# Altium footprint library WR-MPC3.PcbLib: 235 footprints (part 2 of 15)
Each footprint in its own frame and in the unit in brackets; x right, y up, seen from the top. Pads: shape width x height; smd on the part's side, far side on the other; paste and mask are expansions set on the pad; w line width, h text height; cw(c..) or ccw(c..) is an arc to the next point about the centre after c.
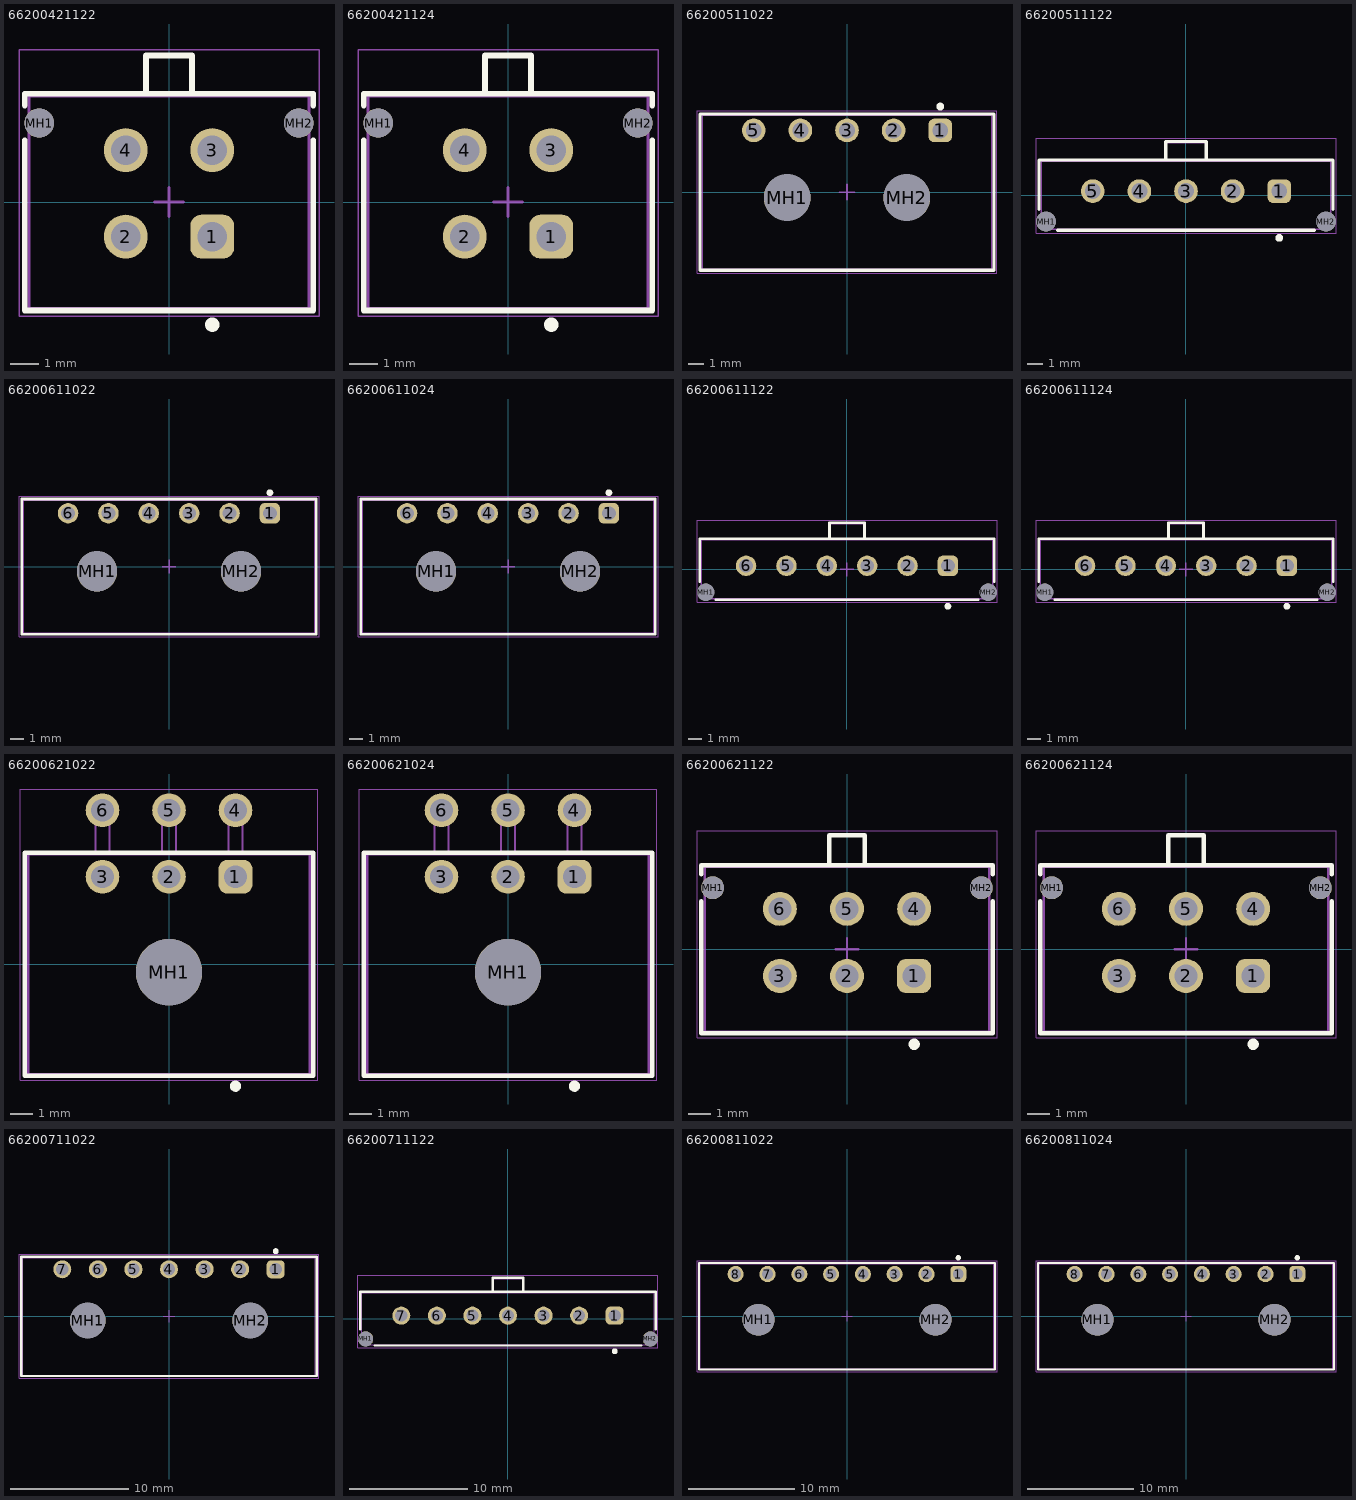
[diagram p1: the footprints below, top view; thin cyan lines are the x and y axes]

## 66200421122 [mm] "Dual row Vertical header 04p"
height 9.9
pads (6):
  rrect50% 1.52x1.52 hole 1.02: 1(1.5,-1.2)
  round 1.52 hole 1.02: 2(-1.5,-1.2) 3(1.5,1.8) 4(-1.5,1.8)
  round 1.02 hole 1.02 unplated: MH1(-4.5,2.74) MH2(4.5,2.74)
Top Overlay:
  circle w0.25: c1.5,-4.25 r0.125
  lines w0.2: -5,2.145 -5,-3.755 5,-3.755 5,2.145 ; -5,3.345 -5,3.755 5,3.755 5,3.345 ; -0.8,3.755 -0.8,5.08 0.8,5.08 0.8,3.755
Top Assembly:
  lines w0.1: -0.8,3.68 -0.8,5.08 0.8,5.08 0.8,3.68 ; -4.85,-3.68 4.85,-3.68 4.85,3.68 -4.85,3.68 -4.85,-3.68
Top Designator:
  text ".Designator" at -3.647,-0.357 h1
Top 3D Body:
  lines w0.1: -0.8,3.68 -0.8,5.08 0.8,5.08 0.8,3.68 ; -4.85,-3.68 4.85,-3.68 4.85,3.68 -4.85,3.68 -4.85,-3.68
Top Courtyard:
  lines w0.05: -5.2,-3.955 5.2,-3.955 5.2,5.28 -5.2,5.28 -5.2,-3.955
Top Component Center:
  lines w0.1: -0.5,0 0.5,0 ; 0,-0.5 0,0.5
3D body "66200421122.stp": height 9.93, standoff -3.17, extent -4.85,-3.68 4.85,5.08

## 66200421124 [mm] "Dual row Vertical header 04p"
height 9.9
pads (6):
  rrect50% 1.52x1.52 hole 1.02: 1(1.5,-1.2)
  round 1.52 hole 1.02: 2(-1.5,-1.2) 3(1.5,1.8) 4(-1.5,1.8)
  round 1.02 hole 1.02 unplated: MH1(-4.5,2.74) MH2(4.5,2.74)
Top Overlay:
  circle w0.25: c1.5,-4.25 r0.125
  lines w0.2: -5,2.145 -5,-3.755 5,-3.755 5,2.145 ; -5,3.345 -5,3.755 5,3.755 5,3.345 ; -0.8,3.755 -0.8,5.08 0.8,5.08 0.8,3.755
Top Assembly:
  lines w0.1: -0.8,3.68 -0.8,5.08 0.8,5.08 0.8,3.68 ; -4.85,-3.68 4.85,-3.68 4.85,3.68 -4.85,3.68 -4.85,-3.68
Top Designator:
  text ".Designator" at -3.647,-0.357 h1
Top 3D Body:
  lines w0.1: -0.8,3.68 -0.8,5.08 0.8,5.08 0.8,3.68 ; -4.85,-3.68 4.85,-3.68 4.85,3.68 -4.85,3.68 -4.85,-3.68
Top Courtyard:
  lines w0.05: -5.2,-3.955 5.2,-3.955 5.2,5.28 -5.2,5.28 -5.2,-3.955
Top Component Center:
  lines w0.1: -0.5,0 0.5,0 ; 0,-0.5 0,0.5
3D body "66200421124.stp": height 9.93, standoff -3.17, extent -4.85,-3.68 4.85,5.08

## 66200511022 [mm] "3.00mm Male Single Row Angled Header with Plastic Pegs, 5p"
height 5.07
pads (7):
  rrect50% 1.52x1.52 hole 1.02: 1(6,3.97)
  round 1.52 hole 1.02: 2(3,3.97) 3(0,3.97) 4(-3,3.97) 5(-6,3.97)
  round 3 hole 3 unplated: MH1(-3.85,-0.35) MH2(3.85,-0.35)
Top Overlay:
  circle w0.25: c6,5.5 r0.125
  lines w0.2: -9.45,-5.025 -9.45,5.025 9.45,5.025 9.45,-5.025 -9.45,-5.025
Top Assembly:
  lines w0.1: -9.325,-4.95 9.325,-4.95 9.325,4.95 -9.325,4.95 -9.325,-4.95
Top Designator:
  text ".Designator" at -3.647,-0.357 h1
Top 3D Body:
  lines w0.1: -9.325,-4.95 9.325,-4.95 9.325,4.95 -9.325,4.95 -9.325,-4.95
Top Courtyard:
  lines w0.05: -9.65,-5.225 -9.65,5.225 9.65,5.225 9.65,-5.225 -9.65,-5.225
Top Component Center:
  lines w0.1: -0.5,0 0.5,0 ; 0,-0.5 0,0.5
3D body "66200511022.stp": height 5.6, standoff -3.16, extent -9.325,-4.95 9.325,4.95

## 66200511122 [mm] "3.00mm Male Single Row Vertical Header, 5p"
height 11
pads (7):
  rrect50% 1.52x1.52 hole 1.02: 1(6,0.255)
  round 1.52 hole 1.02: 2(3,0.255) 3(0,0.255) 4(-3,0.255) 5(-6,0.255)
  round 1.27 hole 1.27 unplated: MH1(-9,-1.705) MH2(9,-1.705)
Top Overlay:
  circle w0.25: c6,-2.75 r0.125
  lines w0.2: -9.45,-0.91 -9.45,2.26 9.45,2.26 9.45,-0.91 ; -8.255,-2.26 8.255,-2.26 ; -1.3,2.26 -1.3,3.46 1.3,3.46 1.3,2.26
Top Assembly:
  lines w0.1: -1.3,2.185 -1.3,3.385 1.3,3.385 1.3,2.185 ; 9.325,-2.185 9.325,2.185 -9.325,2.185 -9.325,-2.185 9.33,-2.185
Top Designator:
  text ".Designator" at -3.647,-0.357 h1
Top 3D Body:
  lines w0.1: -1.3,2.185 -1.3,3.385 1.3,3.385 1.3,2.185 ; 9.325,-2.185 9.325,2.185 -9.325,2.185 -9.325,-2.185 9.33,-2.185
Top Courtyard:
  lines w0.05: -9.65,-2.46 9.65,-2.46 9.65,3.66 -9.65,3.66 -9.65,-2.46
Top Component Center:
  lines w0.1: -0.5,0 0.5,0 ; 0,-0.5 0,0.5
3D body "66200511122.stp": height 9.93, standoff -3.15, extent -9.322,-2.185 9.328,3.385

## 66200611022 [mm] "3.00mm Male Single Row Angled Header with Plastic Pegs, 6p"
height 5.07
pads (8):
  rrect50% 1.52x1.52 hole 1.02: 1(7.5,3.97)
  round 1.52 hole 1.02: 2(4.5,3.97) 3(1.5,3.97) 4(-1.5,3.97) 5(-4.5,3.97) 6(-7.5,3.97)
  round 3 hole 3 unplated: MH1(-5.35,-0.35) MH2(5.35,-0.35)
Top Overlay:
  circle w0.25: c7.5,5.5 r0.125
  lines w0.2: -10.95,-5.025 10.95,-5.025 10.95,5.025 -10.95,5.025 -10.95,-5.025
Top Assembly:
  lines w0.1: -10.825,-4.95 -10.825,4.95 10.825,4.95 10.825,-4.95 -10.825,-4.95
Top Designator:
  text ".Designator" at -3.647,-0.357 h1
Top 3D Body:
  lines w0.1: -10.825,-4.95 -10.825,4.95 10.825,4.95 10.825,-4.95 -10.825,-4.95
Top Courtyard:
  lines w0.05: -11.15,-5.225 11.15,-5.225 11.15,5.225 -11.15,5.225 -11.15,-5.225
Top Component Center:
  lines w0.1: -0.5,0 0.5,0 ; 0,-0.5 0,0.5
3D body "66200611022.stp": height 5.6, standoff -3.16, extent -10.825,-4.95 10.825,4.95

## 66200611024 [mm] "3.00mm Male Single Row Angled Header with Plastic Pegs, 6p"
height 5.07
pads (8):
  rrect50% 1.52x1.52 hole 1.02: 1(7.5,3.97)
  round 1.52 hole 1.02: 2(4.5,3.97) 3(1.5,3.97) 4(-1.5,3.97) 5(-4.5,3.97) 6(-7.5,3.97)
  round 3 hole 3 unplated: MH1(-5.35,-0.35) MH2(5.35,-0.35)
Top Overlay:
  circle w0.25: c7.5,5.5 r0.125
  lines w0.2: -10.95,-5.025 -10.95,5.025 10.95,5.025 10.95,-5.025 -10.95,-5.025
Top Assembly:
  lines w0.1: -10.825,-4.95 10.825,-4.95 10.825,4.95 -10.825,4.95 -10.825,-4.95
Top Designator:
  text ".Designator" at -3.647,-0.357 h1
Top 3D Body:
  lines w0.1: -10.825,-4.95 10.825,-4.95 10.825,4.95 -10.825,4.95 -10.825,-4.95
Top Courtyard:
  lines w0.05: -11.15,-5.225 -11.15,5.225 11.15,5.225 11.15,-5.225 -11.15,-5.225
Top Component Center:
  lines w0.1: -0.5,0 0.5,0 ; 0,-0.5 0,0.5
3D body "66200611024.stp": height 5.6, standoff -3.16, extent -10.825,-4.95 10.825,4.95

## 66200611122 [mm] "3.00mm Male Single Row Vertical Header, 6p"
height 11
pads (8):
  rrect50% 1.52x1.52 hole 1.02: 1(7.5,0.255)
  round 1.52 hole 1.02: 2(4.5,0.255) 3(1.5,0.255) 4(-1.5,0.255) 5(-4.5,0.255) 6(-7.5,0.255)
  round 1.27 hole 1.27 unplated: MH1(-10.5,-1.705) MH2(10.5,-1.705)
Top Overlay:
  circle w0.25: c7.5,-2.75 r0.125
  lines w0.2: -10.95,-0.91 -10.95,2.26 10.95,2.26 10.95,-0.91 ; -9.755,-2.26 9.755,-2.26 ; -1.3,2.26 -1.3,3.46 1.3,3.46 1.3,2.26
Top Assembly:
  lines w0.1: -1.3,2.185 -1.3,3.385 1.3,3.385 1.3,2.185 ; 10.825,-2.185 10.825,2.185 -10.825,2.185 -10.825,-2.185 10.83,-2.185
Top Designator:
  text ".Designator" at -3.647,-0.357 h1
Top 3D Body:
  lines w0.1: -1.3,2.185 -1.3,3.385 1.3,3.385 1.3,2.185 ; 10.825,-2.185 10.825,2.185 -10.825,2.185 -10.825,-2.185 10.83,-2.185
Top Courtyard:
  lines w0.05: -11.15,-2.46 11.15,-2.46 11.15,3.66 -11.15,3.66 -11.15,-2.46
Top Component Center:
  lines w0.1: -0.5,0 0.5,0 ; 0,-0.5 0,0.5
3D body "66200611122.stp": height 9.93, standoff -3.82, extent -10.823,-2.185 10.828,3.385

## 66200611124 [mm] "3.00mm Male Single Row Vertical Header, 6p"
height 11
pads (8):
  rrect50% 1.52x1.52 hole 1.02: 1(7.5,0.255)
  round 1.52 hole 1.02: 2(4.5,0.255) 3(1.5,0.255) 4(-1.5,0.255) 5(-4.5,0.255) 6(-7.5,0.255)
  round 1.27 hole 1.27 unplated: MH1(-10.5,-1.705) MH2(10.5,-1.705)
Top Overlay:
  circle w0.25: c7.5,-2.75 r0.125
  lines w0.2: -10.95,-0.91 -10.95,2.26 10.95,2.26 10.95,-0.91 ; -9.755,-2.26 9.755,-2.26 ; -1.3,2.26 -1.3,3.46 1.3,3.46 1.3,2.26
Top Assembly:
  lines w0.1: -1.3,2.185 -1.3,3.385 1.3,3.385 1.3,2.185 ; 10.825,-2.185 10.825,2.185 -10.825,2.185 -10.825,-2.185 10.83,-2.185
Top Designator:
  text ".Designator" at -3.647,-0.357 h1
Top 3D Body:
  lines w0.1: -1.3,2.185 -1.3,3.385 1.3,3.385 1.3,2.185 ; 10.825,-2.185 10.825,2.185 -10.825,2.185 -10.825,-2.185 10.83,-2.185
Top Courtyard:
  lines w0.05: -11.15,-2.46 -11.15,3.66 11.15,3.66 11.15,-2.46 -11.15,-2.46
Top Component Center:
  lines w0.1: -0.5,0 0.5,0 ; 0,-0.5 0,0.5
3D body "66200611124.stp": height 9.93, standoff -3.82, extent -10.823,-2.185 10.827,3.385

## 66200621022 [mm] "Dual row Right angle header With plastic peg 06p"
height 8.76
pads (7):
  rrect50% 1.52x1.52 hole 1.02: 1(3,3.95)
  round 1.52 hole 1.02: 2(0,3.95) 3(-3,3.95) 4(3,6.95) 5(0,6.95) 6(-3,6.95)
  round 3 hole 3 unplated: MH1(0,-0.35)
Top Overlay:
  circle w0.25: c3,-5.5 r0.125
  lines w0.2: -6.5,-5.025 6.5,-5.025 6.5,5.025 -6.5,5.025 -6.5,-5.025
Top Assembly:
  lines w0.1: -3.32,4.95 -3.32,7.27 -2.68,7.27 -2.68,4.95 ; -0.32,4.95 -0.32,7.27 0.32,7.27 0.32,4.95 ; 2.68,4.95 2.68,7.27 3.32,7.27 3.32,4.95 ; -6.35,-4.95 -6.35,4.95 6.35,4.95 6.35,-4.95 -6.35,-4.95
Top Designator:
  text ".Designator" at -3.647,-0.357 h1
Top 3D Body:
  lines w0.1: -3.32,4.95 -3.32,7.27 -2.68,7.27 -2.68,4.95 ; -0.32,4.95 -0.32,7.27 0.32,7.27 0.32,4.95 ; 2.68,4.95 2.68,7.27 3.32,7.27 3.32,4.95 ; -6.35,-4.95 -6.35,4.95 6.35,4.95 6.35,-4.95 -6.35,-4.95
Top Courtyard:
  lines w0.05: -6.7,-5.225 6.7,-5.225 6.7,7.91 -6.7,7.91 -6.7,-5.225
Top Component Center:
  lines w0.1: -0.5,0 0.5,0 ; 0,-0.5 0,0.5
3D body "62000621022.stp": height 8.79, standoff -3.17, extent -6.35,-4.95 6.35,7.27

## 66200621024 [mm] "Dual row Right angle header With plastic peg 06p"
height 8.76
pads (7):
  rrect50% 1.52x1.52 hole 1.02: 1(3,3.95)
  round 1.52 hole 1.02: 2(0,3.95) 3(-3,3.95) 4(3,6.95) 5(0,6.95) 6(-3,6.95)
  round 3 hole 3 unplated: MH1(0,-0.35)
Top Overlay:
  circle w0.25: c3,-5.5 r0.125
  lines w0.2: -6.5,-5.025 -6.5,5.025 6.5,5.025 6.5,-5.025 -6.5,-5.025
Top Assembly:
  lines w0.1: -3.32,4.95 -3.32,7.27 -2.68,7.27 -2.68,4.95 ; -0.32,4.95 -0.32,7.27 0.32,7.27 0.32,4.95 ; 2.68,4.95 2.68,7.27 3.32,7.27 3.32,4.95 ; -6.35,-4.95 6.35,-4.95 6.35,4.95 -6.35,4.95 -6.35,-4.95
Top Designator:
  text ".Designator" at -3.647,-0.357 h1
Top 3D Body:
  lines w0.1: -3.32,4.95 -3.32,7.27 -2.68,7.27 -2.68,4.95 ; -0.32,4.95 -0.32,7.27 0.32,7.27 0.32,4.95 ; 2.68,4.95 2.68,7.27 3.32,7.27 3.32,4.95 ; -6.35,-4.95 6.35,-4.95 6.35,4.95 -6.35,4.95 -6.35,-4.95
Top Courtyard:
  lines w0.05: -6.7,-5.225 -6.7,7.91 6.7,7.91 6.7,-5.225 -6.7,-5.225
Top Component Center:
  lines w0.1: -0.5,0 0.5,0 ; 0,-0.5 0,0.5
3D body "66200621024.stp": height 8.78, standoff -3.19, extent -6.362,-4.955 6.365,7.274

## 66200621122 [mm] "Dual row Vertical header 06p"
height 9.9
pads (8):
  rrect50% 1.52x1.52 hole 1.02: 1(3,-1.2)
  round 1.52 hole 1.02: 2(0,-1.2) 3(-3,-1.2) 4(3,1.8) 5(0,1.8) 6(-3,1.8)
  round 1.02 hole 1.02 unplated: MH1(-6,2.74) MH2(6,2.74)
Top Overlay:
  circle w0.25: c3,-4.25 r0.125
  lines w0.2: -6.5,2.145 -6.5,-3.755 6.5,-3.755 6.5,2.145 ; -6.5,3.345 -6.5,3.755 6.5,3.755 6.5,3.345 ; -0.8,3.755 -0.8,5.08 0.8,5.08 0.8,3.755
Top Assembly:
  lines w0.1: -0.8,3.68 -0.8,5.08 0.8,5.08 0.8,3.68 ; -6.35,-3.68 -6.35,3.68 6.35,3.68 6.35,-3.68 -6.35,-3.68
Top Designator:
  text ".Designator" at -3.647,-0.357 h1
Top 3D Body:
  lines w0.1: -0.8,3.68 -0.8,5.08 0.8,5.08 0.8,3.68 ; -6.35,-3.68 -6.35,3.68 6.35,3.68 6.35,-3.68 -6.35,-3.68
Top Courtyard:
  lines w0.05: -6.7,-3.955 -6.7,5.28 6.7,5.28 6.7,-3.955 -6.7,-3.955
Top Component Center:
  lines w0.1: -0.5,0 0.5,0 ; 0,-0.5 0,0.5
3D body "66200621122.stp": height 9.93, standoff -3.17, extent -6.35,-3.68 6.35,5.08

## 66200621124 [mm] "Dual row Vertical header 06p"
height 9.9
pads (8):
  rrect50% 1.52x1.52 hole 1.02: 1(3,-1.2)
  round 1.52 hole 1.02: 2(0,-1.2) 3(-3,-1.2) 4(3,1.8) 5(0,1.8) 6(-3,1.8)
  round 1.02 hole 1.02 unplated: MH1(-6,2.74) MH2(6,2.74)
Top Overlay:
  circle w0.25: c3,-4.25 r0.125
  lines w0.2: -6.5,2.145 -6.5,-3.755 6.5,-3.755 6.5,2.145 ; -6.5,3.345 -6.5,3.755 6.5,3.755 6.5,3.345 ; -0.8,3.755 -0.8,5.08 0.8,5.08 0.8,3.755
Top Assembly:
  lines w0.1: -0.8,3.68 -0.8,5.08 0.8,5.08 0.8,3.68 ; -6.35,-3.68 -6.35,3.68 6.35,3.68 6.35,-3.68 -6.35,-3.68
Top Designator:
  text ".Designator" at -3.647,-0.357 h1
Top 3D Body:
  lines w0.1: -0.8,3.68 -0.8,5.08 0.8,5.08 0.8,3.68 ; -6.35,-3.68 -6.35,3.68 6.35,3.68 6.35,-3.68 -6.35,-3.68
Top Courtyard:
  lines w0.05: -6.7,-3.955 -6.7,5.28 6.7,5.28 6.7,-3.955 -6.7,-3.955
Top Component Center:
  lines w0.1: -0.5,0 0.5,0 ; 0,-0.5 0,0.5
3D body "66200621124.stp": height 9.93, standoff -3.17, extent -6.35,-3.68 6.35,5.08

## 66200711022 [mm] "3.00mm Male Single Row Angled Header with Plastic Pegs, 7p"
height 5.07
pads (9):
  rrect50% 1.52x1.52 hole 1.02: 1(9,3.97)
  round 1.52 hole 1.02: 2(6,3.97) 3(3,3.97) 4(0,3.97) 5(-3,3.97) 6(-6,3.97) 7(-9,3.97)
  round 3 hole 3 unplated: MH1(-6.85,-0.35) MH2(6.85,-0.35)
Top Overlay:
  circle w0.25: c9,5.5 r0.125
  lines w0.2: -12.45,-5.025 12.45,-5.025 12.45,5.025 -12.45,5.025 -12.45,-5.025
Top Assembly:
  lines w0.1: -12.325,-4.95 -12.325,4.95 12.325,4.95 12.325,-4.95 -12.325,-4.95
Top Designator:
  text ".Designator" at -3.647,-0.357 h1
Top 3D Body:
  lines w0.1: -12.325,-4.95 -12.325,4.95 12.325,4.95 12.325,-4.95 -12.325,-4.95
Top Courtyard:
  lines w0.05: -12.65,-5.225 12.65,-5.225 12.65,5.225 -12.65,5.225 -12.65,-5.225
Top Component Center:
  lines w0.1: -0.5,0 0.5,0 ; 0,-0.5 0,0.5
3D body "66200711022.stp": height 5.6, standoff -3.16, extent -12.325,-4.95 12.325,4.95

## 66200711122 [mm] "3.00mm Male Single Row Vertical Header, 7p"
height 11
pads (9):
  rrect50% 1.52x1.52 hole 1.02: 1(9,0.255)
  round 1.52 hole 1.02: 2(6,0.255) 3(3,0.255) 4(0,0.255) 5(-3,0.255) 6(-6,0.255) 7(-9,0.255)
  round 1.27 hole 1.27 unplated: MH1(-12,-1.705) MH2(12,-1.705)
Top Overlay:
  circle w0.25: c9,-2.75 r0.125
  lines w0.2: -12.45,-0.91 -12.45,2.26 12.45,2.26 12.45,-0.91 ; -11.255,-2.26 11.255,-2.26 ; -1.3,2.26 -1.3,3.46 1.3,3.46 1.3,2.26
Top Assembly:
  lines w0.1: -1.3,2.185 -1.3,3.385 1.3,3.385 1.3,2.185 ; 12.325,-2.185 12.325,2.185 -12.325,2.185 -12.325,-2.185 12.33,-2.185
Top Designator:
  text ".Designator" at -3.647,-0.357 h1
Top 3D Body:
  lines w0.1: -1.3,2.185 -1.3,3.385 1.3,3.385 1.3,2.185 ; 12.325,-2.185 12.325,2.185 -12.325,2.185 -12.325,-2.185 12.33,-2.185
Top Courtyard:
  lines w0.05: -12.65,-2.46 -12.65,3.66 12.65,3.66 12.65,-2.46 -12.65,-2.46
Top Component Center:
  lines w0.1: -0.5,0 0.5,0 ; 0,-0.5 0,0.5
3D body "66200711122.stp": height 9.93, standoff -3.82, extent -12.322,-2.185 12.327,3.385

## 66200811022 [mm] "3.00mm Male Single Row Angled Header with Plastic Pegs, 8p"
height 5.07
pads (10):
  rrect50% 1.52x1.52 hole 1.02: 1(10.5,3.97)
  round 1.52 hole 1.02: 2(7.5,3.97) 3(4.5,3.97) 4(1.5,3.97) 5(-1.5,3.97) 6(-4.5,3.97) 7(-7.5,3.97) 8(-10.5,3.97)
  round 3 hole 3 unplated: MH1(-8.35,-0.35) MH2(8.35,-0.35)
Top Overlay:
  circle w0.25: c10.5,5.5 r0.125
  lines w0.2: -13.95,-5.025 13.95,-5.025 13.95,5.025 -13.95,5.025 -13.95,-5.025
Top Assembly:
  lines w0.1: -13.825,-4.95 -13.825,4.95 13.825,4.95 13.825,-4.95 -13.825,-4.95
Top Designator:
  text ".Designator" at -3.647,-0.357 h1
Top 3D Body:
  lines w0.1: -13.825,-4.95 -13.825,4.95 13.825,4.95 13.825,-4.95 -13.825,-4.95
Top Courtyard:
  lines w0.05: -14.15,-5.225 14.15,-5.225 14.15,5.225 -14.15,5.225 -14.15,-5.225
Top Component Center:
  lines w0.1: -0.5,0 0.5,0 ; 0,-0.5 0,0.5
3D body "66200811022.stp": height 5.6, standoff -3.16, extent -13.825,-4.95 13.825,4.95

## 66200811024 [mm] "3.00mm Male Single Row Angled Header with Plastic Pegs, 8p"
height 5.07
pads (10):
  rrect50% 1.52x1.52 hole 1.02: 1(10.5,3.97)
  round 1.52 hole 1.02: 2(7.5,3.97) 3(4.5,3.97) 4(1.5,3.97) 5(-1.5,3.97) 6(-4.5,3.97) 7(-7.5,3.97) 8(-10.5,3.97)
  round 3 hole 3 unplated: MH1(-8.35,-0.35) MH2(8.35,-0.35)
Top Overlay:
  circle w0.25: c10.5,5.5 r0.125
  lines w0.2: -13.95,-5.025 13.95,-5.025 13.95,5.025 -13.95,5.025 -13.95,-5.025
Top Assembly:
  lines w0.1: -13.825,-4.95 -13.825,4.95 13.825,4.95 13.825,-4.95 -13.825,-4.95
Top Designator:
  text ".Designator" at -3.647,-0.357 h1
Top 3D Body:
  lines w0.1: -13.825,-4.95 -13.825,4.95 13.825,4.95 13.825,-4.95 -13.825,-4.95
Top Courtyard:
  lines w0.05: -14.15,-5.225 14.15,-5.225 14.15,5.225 -14.15,5.225 -14.15,-5.225
Top Component Center:
  lines w0.1: -0.5,0 0.5,0 ; 0,-0.5 0,0.5
3D body "66200811024.stp": height 5.6, standoff -3.16, extent -13.825,-4.95 13.825,4.95